# Altium footprint library Analog_Project_Mixer.PcbLib: 19 footprints (part 1 of 2)
Each footprint in its own frame and in the unit in brackets; x right, y up, seen from the top. Pads: shape width x height; smd on the part's side, far side on the other; paste and mask are expansions set on the pad; w line width, h text height; cw(c..) or ccw(c..) is an arc to the next point about the centre after c.
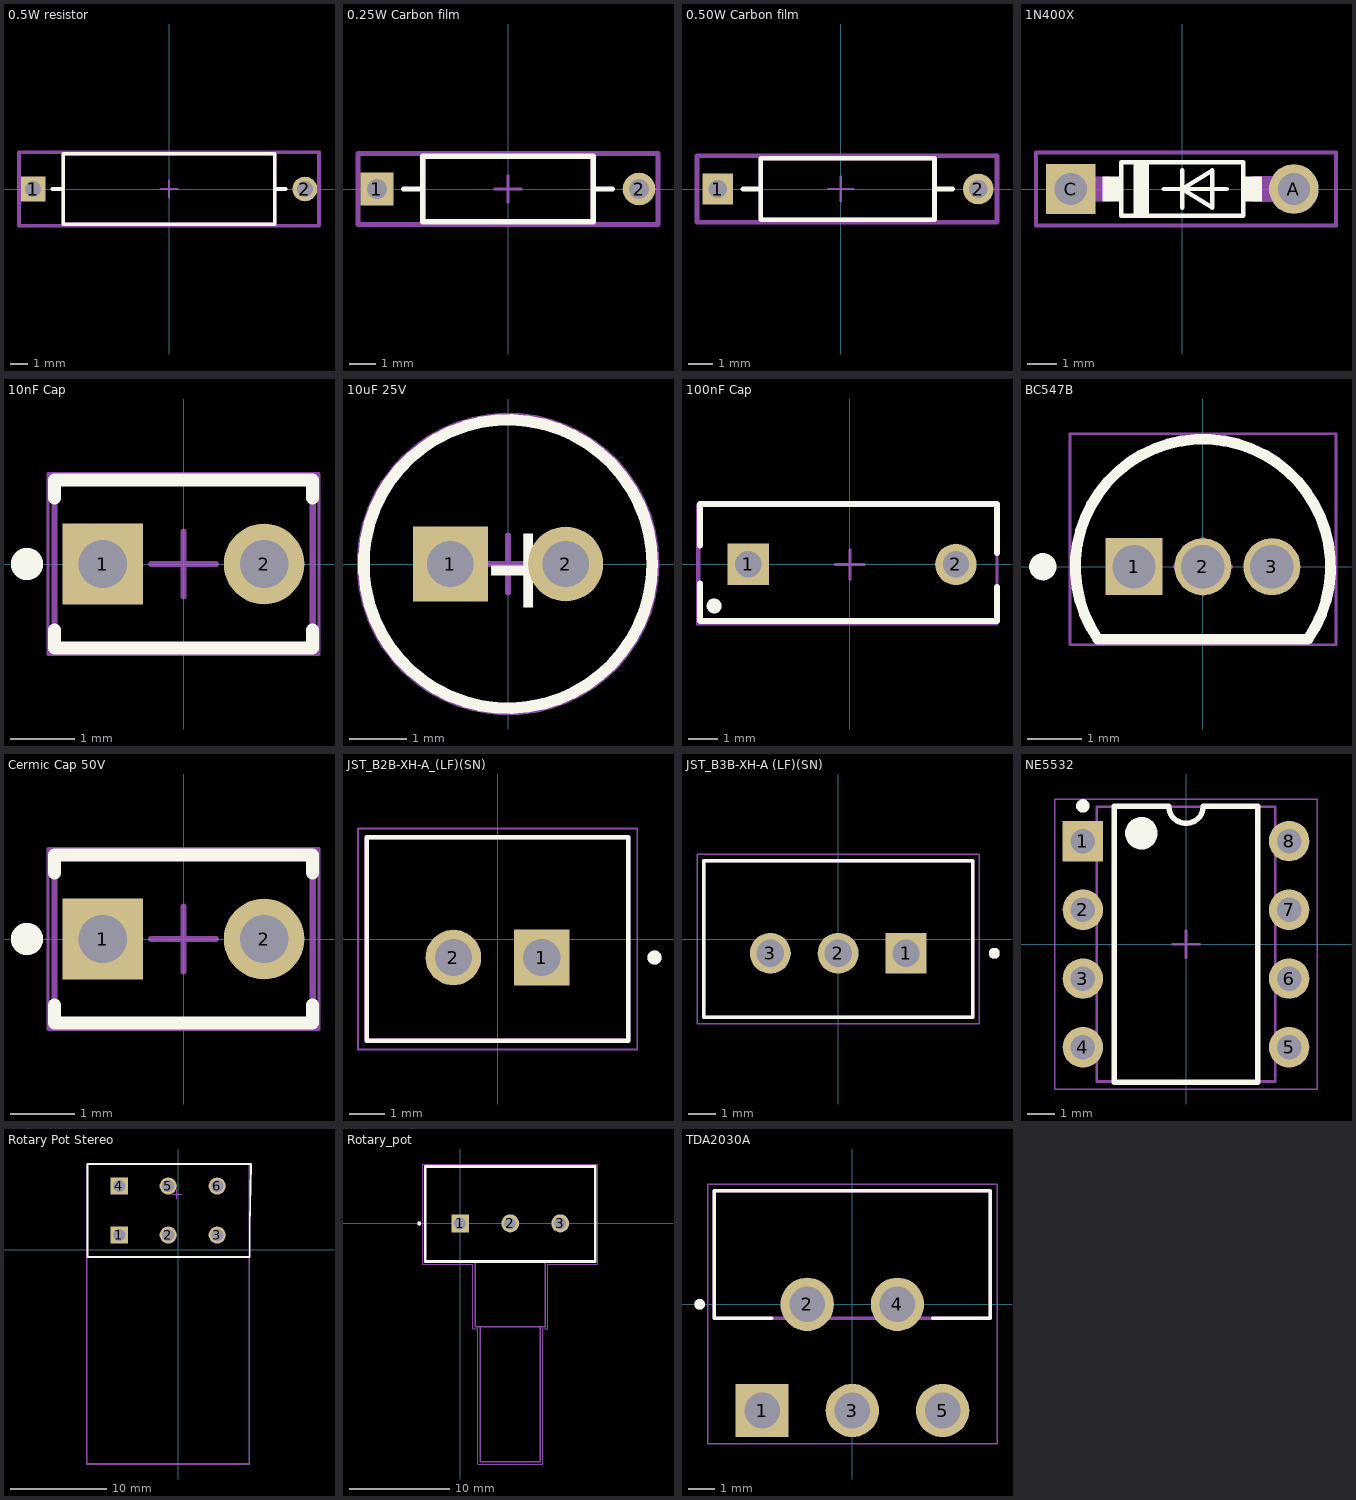
[diagram p0: the footprints below, top view; thin cyan lines are the x and y axes]

## 0.5W resistor [mm]
pads (2):
  rect 1.4x1.4 hole 0.9 paste-2539.97 mask+0: 1(-7.73,0)
  round 1.4 hole 0.9 paste-2539.97 mask+0: 2(7.73,0)
Top Overlay:
  lines w0.2: -6.63,0 -6,0 ; 6,0 6.63,0 ; -6,-2 6,-2 6,2 -6,2 -6,-2
  text ".Designator" at 0,0.188 h1
Top 3D Body:
  lines w0.2: -6,-2 6,-2 6,2 -6,2 -6,-2
Top Courtyard:
  lines w0.2: -8.53,-2.1 8.53,-2.1 8.53,2.1 -8.53,2.1 -8.53,-2.1
Top Assembly:
  lines w0.2: -8.53,-2.1 8.53,-2.1 8.53,2.1 -8.53,2.1 -8.53,-2.1
Top Component Center:
  lines w0.1: -0.5,0 0.5,0 ; 0,-0.5 0,0.5
3D body "Res_Vishay_VR37000001204JA100_eec.STEP": height 0.25, standoff 0, extent -8.53,-2.1 8.53,2.1

## 0.25W Carbon film [mm]
pads (2):
  rect 1.25x1.25 hole 0.75 paste-2539.97 mask+0: 1(-5,0)
  round 1.25 hole 0.75 paste-2539.97 mask+0: 2(5,0)
Top Overlay:
  lines w0.2: -3.975,0 -3.25,0 ; 3.25,0 3.975,0 ; -3.25,-1.25 3.25,-1.25 3.25,1.25 -3.25,1.25 -3.25,-1.25
Top 3D Body:
  lines w0.2: -3.25,-1.25 3.25,-1.25 3.25,1.25 -3.25,1.25 -3.25,-1.25
Board:
  lines w0.2: -5.725,-1.35 5.725,-1.35 5.725,1.35 -5.725,1.35 -5.725,-1.35
Top Assembly:
  lines w0.2: -5.725,-1.35 5.725,-1.35 5.725,1.35 -5.725,1.35 -5.725,-1.35
Top Component Center:
  lines w0.1: -0.5,0 0.5,0 ; 0,-0.5 0,0.5
3D body "Res_Vishay_MRS25000C1910FCT00_eec.STEP": height 0.25, standoff 0, extent -5.725,-1.35 5.725,1.35

## 0.50W Carbon film [mm]
pads (2):
  rect 1.25x1.25 hole 0.75 paste-2539.97 mask+0: 1(-5,0)
  round 1.25 hole 0.75 paste-2539.97 mask+0: 2(5.588,0)
Top Overlay:
  lines w0.2: -3.975,0 -3.25,0 ; 3.81,0 4.535,0 ; -3.25,-1.25 3.81,-1.25 3.81,1.25 -3.25,1.25 -3.25,-1.25
Top 3D Body:
  lines w0.2: -3.25,-1.25 3.81,-1.25 3.81,1.25 -3.25,1.25 -3.25,-1.25
Board:
  lines w0.2: -5.842,-1.35 -5.842,1.35 6.35,1.35 6.35,-1.35 -5.842,-1.35
Top Assembly:
  lines w0.2: 3.396,1.35 -5.842,1.35 -5.842,-1.35 6.35,-1.35 6.35,-0.421 6.35,0.421 6.35,1.35
Top Component Center:
  lines w0.1: -0.5,0 0.5,0 ; 0,-0.5 0,0.5
3D body "Res_Vishay_MRS25000C1910FCT00_eec.STEP": height 0.25, standoff 0, extent -5.354,-1.43 6.096,1.27

## 1N400X [mm]
pads (2):
  round 1.7 hole 1.1: A(3.81,0)
  rect 1.7x1.7 / inner round 1.7 / far side rect 1.7x1.7 hole 1.1: C(-3.81,0)
Top Overlay:
  region: -2.082,-0.426 -2.721,-0.426 -2.721,0.425 -2.082,0.425
  region: 2.717,-0.426 2.089,-0.426 2.089,0.425 2.717,0.425
  region: -1.143,-0.951 -1.653,-0.951 -1.653,0.92 -1.143,0.92
  lines w0.152: -0.635,0 0,0 ; 0,-0.635 0,0 ; 0,0.635 0,0 ; 1.524,0 0,0 ; 0,0 1.016,0.635 1.016,-0.635 0,0 ; -2.082,-0.92 -2.082,0.92 2.082,0.92 2.082,-0.92 -2.082,-0.92
Mechanical 13:
  lines w0.85: -3.81,0 -2.519,0
  lines w0.889: 2.494,0 3.81,0
Mechanical 15:
  lines w0.127: -5,-1.25 -5,1.25 5.25,1.25 5.25,-1.25 -5,-1.25
3D body "1N4007E-E3_64.STEP": height 2.74, standoff -21, extent -5.743,-1.35 5.743,1.35

## 10nF Cap [mm] "THD, 2-Leads, Body 4x2.6mm"
height 5.6
pads (2):
  rect 1.25x1.25 hole 0.75: 1(-1.25,0)
  round 1.25 hole 0.75: 2(1.25,0)
Top Overlay:
  circle w0.25: c-2.425,0 r0.125
  lines w0.2: -2,-1.025 -2,-1.3 2,-1.3 2,-1.025 ; -2,1.025 -2,1.3 2,1.3 2,1.025
Mechanical 13:
  lines w0.1: -2,-1.3 -2,1.3 2,1.3 2,-1.3 -2,-1.3
Mechanical 15:
  lines w0.05: -2.1,-1.4 -2.1,1.4 2.1,1.4 2.1,-1.4 -2.1,-1.4
  lines w0.1: -0.5,0 0.5,0 ; 0,-0.5 0,0.5
3D body: height 5.6, standoff 0, extent -2,-1.3 2,1.3

## 10uF 25V [mm] "THD, 2-Leads, Dia 5mm, Body Length 11mm"
height 12
pads (2):
  rect 1.3x1.3 hole 0.8: 1(-1,0)
  round 1.3 hole 0.8: 2(1,0)
Top Overlay:
  circle w0.2: c0,0 r2.5
  text "+" at -0.508,-0.762 h1.5
Mechanical 13:
  circle w0.1: c0,0 r2.5
Mechanical 15:
  circle w0.05: c0,0 r2.6
  lines w0.1: -0.5,0 0.5,0 ; 0,-0.5 0,0.5
3D body: height 12, standoff 0, extent -2.499,-2.499 2.499,2.499

## 100nF Cap [mil] "THD, 2-Leads, Body 4x2.6mm"
height 220.47
pads (2):
  rect 55x55 hole 35: 1(-135,0)
  round 55 hole 35: 2(140.59,0)
Top Overlay:
  circle w9.84: c-180,-55 r4.92
  lines w7.87: -198.74,-25 -198.74,-75 195,-75 195,-30 ; -198.74,25 -198.74,80 195,80 195,15.35
Mechanical 13:
  lines w3.94: 194.96,81.18 -200,81.18 -200,-76.18 195,-76.18 195,81.3
Mechanical 15:
  lines w1.97: -202.68,-80.12 195,-80.12 195,80 -202.68,80 -202.68,-80.12
  lines w3.94: -20,0 19.37,0 ; 0,-19.68 0,19.68
3D body: height 10, standoff 0, extent -198.74,-76.18 192.09,79.6

## BC547B [mm] "TO, 3-Leads, Body Dia 4.7mm, Pitch 1.27mm"
height 7.87
pads (3):
  rect 1.05x1.05 hole 0.8: 1(-1.27,0)
  round 1.05 hole 0.8: 2(0,0) 3(1.27,0)
Top Overlay:
  circle w0.25: c-2.95,0 r0.125
  lines w0.2: -1.934,-1.335 cw(c0,0) 1.934,-1.335 -1.934,-1.335
Mechanical 13:
  lines w0.1: -1.934,-1.335 cw(c0,0) 1.934,-1.335 -1.934,-1.335
Mechanical 15:
  lines w0.05: -2.45,-1.435 2.45,-1.435 2.45,2.45 -2.45,2.45 -2.45,-1.435
  lines w0.1: -0.5,0 0.5,0 ; 0,-0.5 0,0.5
3D body: height 7.87, standoff 2.54, extent -2.349,-1.334 2.357,2.359

## Cermic Cap 50V [mm] "THD, 2-Leads, Body 4x2.6mm"
height 5.6
pads (2):
  rect 1.25x1.25 hole 0.75: 1(-1.25,0)
  round 1.25 hole 0.75: 2(1.25,0)
Top Overlay:
  circle w0.25: c-2.425,0 r0.125
  lines w0.2: -2,-1.025 -2,-1.3 2,-1.3 2,-1.025 ; -2,1.025 -2,1.3 2,1.3 2,1.025
Mechanical 13:
  lines w0.1: -2,-1.3 -2,1.3 2,1.3 2,-1.3 -2,-1.3
Mechanical 15:
  lines w0.05: -2.1,-1.4 -2.1,1.4 2.1,1.4 2.1,-1.4 -2.1,-1.4
  lines w0.1: -0.5,0 0.5,0 ; 0,-0.5 0,0.5
3D body: height 5.6, standoff 0, extent -2,-1.3 2,1.3

## JST_B2B-XH-A_(LF)(SN) [mm]
height 7
pads (2):
  rect 1.575x1.575 / inner round 1.575 / far side rect 1.575x1.575 hole 1.05: 1(1.25,-0.525)
  round 1.575 hole 1.05: 2(-1.25,-0.525)
Top Overlay:
  circle w0.2: c4.44,-0.525 r0.1
  lines w0.127: -3.7,-2.875 -3.7,2.875 3.7,2.875 3.7,-2.875 -3.7,-2.875
Mechanical 13:
  circle w0.2: c4.44,-0.525 r0.1
  lines w0.127: -3.7,-2.875 -3.7,2.875 3.7,2.875 3.7,-2.875 -3.7,-2.875
Mechanical 15:
  lines w0.05: -3.95,-3.125 3.95,-3.125 3.95,3.125 -3.95,3.125 -3.95,-3.125
3D body "step_temp.STEP": height 7, standoff -3.4, extent -3.7,-2.875 3.7,2.875

## JST_B3B-XH-A (LF)(SN) [mm]
height 7
pads (3):
  rect 1.508x1.508 / inner round 1.508 / far side rect 1.508x1.508 hole 1: 1(2.5,-0.525)
  round 1.508 hole 1: 2(0,-0.525) 3(-2.5,-0.525)
Top Overlay:
  circle w0.2: c5.75,-0.525 r0.1
  lines w0.127: -4.95,-2.875 -4.95,2.875 4.95,2.875 4.95,-2.875 -4.95,-2.875
Mechanical 13:
  circle w0.2: c5.75,-0.525 r0.1
  lines w0.127: -4.95,-2.875 -4.95,2.875 4.95,2.875 4.95,-2.875 -4.95,-2.875
Mechanical 15:
  lines w0.05: -5.2,-3.125 -5.2,3.125 5.2,3.125 5.2,-3.125 -5.2,-3.125
3D body "step_temp.STEP": height 7, standoff -3.4, extent -4.95,-2.875 4.95,2.875

## NE5532 [mm] "DIP, 8-Leads, Body 10.15x6.6mm, Pitch 2.54mm"
height 5.08
pads (8):
  rect 1.5x1.5 hole 0.9: 1(-3.81,3.81)
  round 1.5 hole 0.9: 2(-3.81,1.27) 3(-3.81,-1.27) 4(-3.81,-3.81) 5(3.81,-3.81) 6(3.81,-1.27) 7(3.81,1.27) 8(3.81,3.81)
Top Overlay:
  circle w0.25: c-3.81,5.11 r0.125
  circle w0.6: c-1.65,4.1 r0.3
  lines w0.2: -2.65,-5.1 -2.65,5.1 -0.635,5.1 ccw(c0,5.1) 0.635,5.1 2.65,5.1 2.65,-5.1 -2.65,-5.1
Mechanical 1:
  text ".Designator" at -1.524,-0.508 h1.02
Mechanical 13:
  circle w0.1: c-1.651,4.064 r0.5
  lines w0.1: -3.3,-5.075 3.3,-5.075 3.3,5.075 -3.3,5.075 -3.3,-5.075
Mechanical 15:
  lines w0.05: -4.85,-5.35 -4.85,5.35 4.85,5.35 4.85,-5.35 -4.85,-5.35
  lines w0.1: -0.5,0 0.5,0 ; 0,-0.5 0,0.5
3D body: height 2.66, standoff 0, extent -3.945,3.31 -3.675,4.31
3D body: height 2.93, standoff 2.66, extent -3.945,3.31 -3.3,4.31
3D body: height 0, standoff -1.6, extent -3.945,3.45 -3.675,4.17
3D body: height 2.66, standoff 0, extent -3.945,0.77 -3.675,1.77
3D body: height 2.93, standoff 2.66, extent -3.945,0.77 -3.3,1.77
3D body: height 0, standoff -1.6, extent -3.945,0.91 -3.675,1.63
3D body: height 2.66, standoff 0, extent -3.945,-1.77 -3.675,-0.77
3D body: height 2.93, standoff 2.66, extent -3.945,-1.77 -3.3,-0.77
3D body: height 0, standoff -1.6, extent -3.945,-1.63 -3.675,-0.91
3D body: height 2.66, standoff 0, extent -3.945,-4.31 -3.675,-3.31
3D body: height 2.93, standoff 2.66, extent -3.945,-4.31 -3.3,-3.31
3D body: height 0, standoff -1.6, extent -3.945,-4.17 -3.675,-3.45
3D body: height 2.66, standoff 0, extent 3.675,-4.31 3.945,-3.31
3D body: height 2.93, standoff 2.66, extent 3.3,-4.31 3.945,-3.31
3D body: height 0, standoff -1.6, extent 3.675,-4.17 3.945,-3.45
3D body: height 2.66, standoff 0, extent 3.675,-1.77 3.945,-0.77
3D body: height 2.93, standoff 2.66, extent 3.3,-1.77 3.945,-0.77
3D body: height 0, standoff -1.6, extent 3.675,-1.63 3.945,-0.91
3D body: height 2.66, standoff 0, extent 3.675,0.77 3.945,1.77
3D body: height 2.93, standoff 2.66, extent 3.3,0.77 3.945,1.77
3D body: height 0, standoff -1.6, extent 3.675,0.91 3.945,1.63
3D body: height 2.66, standoff 0, extent 3.675,3.31 3.945,4.31
3D body: height 2.93, standoff 2.66, extent 3.3,3.31 3.945,4.31
3D body: height 0, standoff -1.6, extent 3.675,3.45 3.945,4.17
3D body: height 5.08, standoff 0.51, extent -3.3,-5.075 3.3,5.075

## PCBComponent_1 [mm]

## Rotary Pot Stereo [mil]
pads (6):
  rect 70x70 hole 50: 1(-240,60) 4(-240,260)
  round 70 hole 50: 2(-40,60) 3(160,60) 5(-40,260) 6(160,260)
Top Overlay:
  lines w7.87: -370,-30 -370,350 298.35,350 292.6,92.74 292.6,-30 -370,-30
Mechanical 13:
  lines w3.94: -372,-874 292.6,-874 292.6,348 -372,348 -372,-874
Mechanical 15:
  lines w1.97: -370,-870 -370,350 290,350 290,-870 -370,-870
  lines w3.94: -24.68,227.06 14.69,227.06 ; -5,207.38 -5,246.75
3D body "KLS4-WH148-1B-4F-L20--3DModel-STEP-269445.STEP": height 826.77, standoff -157.34, extent -374.36,-874.41 294.36,350

## Rotary_pot [mm]
height 21.5
pads (3):
  rect 1.8x1.8 / inner round 1.8 / far side rect 1.8x1.8 hole 1.2: 1(0,0)
  round 1.8 hole 1.2: 2(5,0) 3(10,0)
Top Overlay:
  circle w0.2: c-4.1,0 r0.1
  lines w0.254: -3.5,-3.81 13.5,-3.81 13.5,5.69 -3.5,5.69 -3.5,-3.81
Mechanical 13:
  circle w0.2: c-4.1,0 r0.1
  lines w0.127: 1.5,-3.81 -3.5,-3.81 -3.5,5.69 13.5,5.69 13.5,-3.81 8.5,-3.81 ; 1.5,-3.81 8.5,-3.81 ; 1.5,-3.81 1.5,-10.31 2,-10.31 ; 2,-10.31 8,-10.31 ; 2,-10.31 2,-23.81 8,-23.81 8,-10.31 ; 8,-10.31 8.5,-10.31 8.5,-3.81
  text "PCB Edge" at 5.334,-2.794 h0.9
Mechanical 15:
  lines w0.05: -3.75,-4.06 -3.75,5.94 13.75,5.94 13.75,-4.06 8.75,-4.06 8.75,-10.56 8.25,-10.56 8.25,-24.06 1.75,-24.06 1.75,-10.56 1.25,-10.56 1.25,-4.06 -3.75,-4.06
3D body "step_temp.STEP": height 2.8, standoff -21.2, extent -3.411,-23.912 13.589,5.588

## TDA2030A [mm]
height 21.15
pads (5):
  rect 2.01x2.01 / inner round 2.01 / far side rect 2.01x2.01 hole 1.34: 1(-3.4,-4)
  round 2.01 hole 1.34: 2(-1.7,0) 3(0,-4) 4(1.7,0) 5(3.4,-4)
Top Overlay:
  circle w0.2: c-5.75,0 r0.1
  lines w0.127: -3.025,-0.525 -5.2,-0.525 -5.2,4.275 5.2,4.275 5.2,-0.525 3.025,-0.525
Mechanical 13:
  circle w0.2: c-5.75,0 r0.1
  lines w0.127: -5.2,-0.525 5.2,-0.525 5.2,4.275 -5.2,4.275 -5.2,-0.525
Mechanical 15:
  lines w0.05: -5.45,-5.255 -5.45,4.525 5.45,4.525 5.45,-5.255 -5.45,-5.255
3D body "step_temp.STEP": height 21.15, standoff -4.55, extent -5.2,-4.225 5.2,4.275